# Altium footprint library HEADER-PH2.0-6P.PcbLib: 1 footprints
Each footprint in its own frame and in the unit in brackets; x right, y up, seen from the top. Pads: shape width x height; smd on the part's side, far side on the other; paste and mask are expansions set on the pad; w line width, h text height; cw(c..) or ccw(c..) is an arc to the next point about the centre after c.
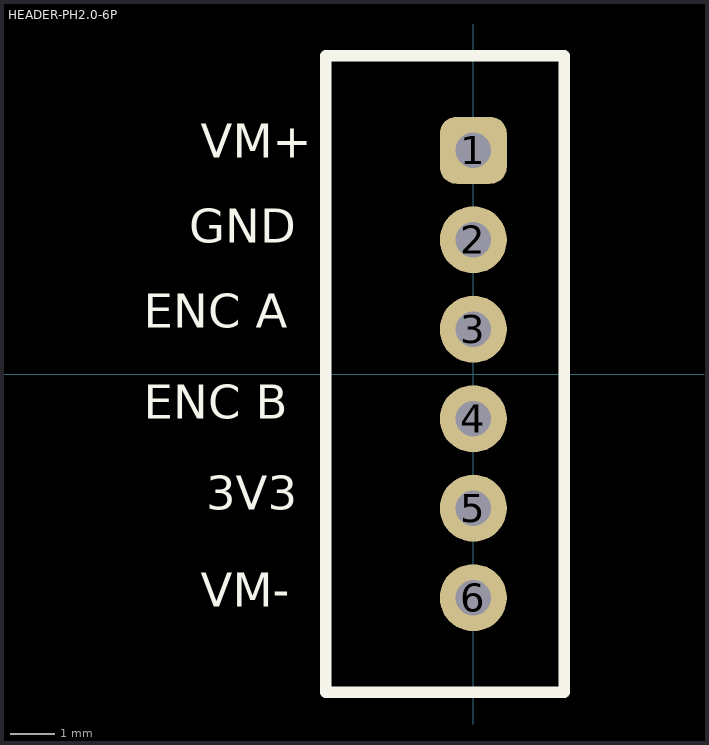
[diagram p0: the footprint, top view; thin cyan lines are the x and y axes]

## HEADER-PH2.0-6P [mm] "HEADER KẾT NỐI PCB VÀ DC MOTOR"
pads (6):
  rrect50% 1.5x1.5 hole 0.8: 1(0,5)
  round 1.5 hole 0.8: 2(0,3) 3(0,1) 4(0,-1) 5(0,-3) 6(0,-5)
Top Overlay:
  lines w0.254: -3.302,-7.112 2.032,-7.112 2.032,7.112 -3.302,7.112 -3.302,-7.112
  text "VM-" at -6.095,-5.461 h1.3
  text "3V3" at -5.969,-3.288 h1.3
  text "ENC B" at -7.366,-1.256 h1.3
  text "ENC A" at -7.366,0.776 h1.3
  text "GND" at -6.35,2.681 h1.3
  text "VM+" at -6.095,4.572 h1.3
3D body "B6B-PH-K-S.stp": height 6, standoff -3.4, extent -2.8,-6.95 1.7,6.95